# Altium schematic symbol library 2019-09-16_09-55-57.SchLib: 2 symbols
Pins are listed as number, name and electrical type; pins without a type are passive.

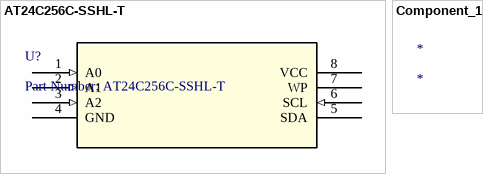
[diagram p0: symbols AT24C256C-SSHL-T to Component_1]

## AT24C256C-SSHL-T
designator U?, comment Part Number: AT24C256C-SSHL-T
No Description Available; Vendor: Atmel; Built_By: EMA_UL_Team; Manufacturer_Part_Number: AT24C256C-SSHL-T; Copyright: Copyright (C) 2018 Accelerated Designs. All rights reserved; RefDes: RefDes; Type: DEV; Value: Value
footprint 8S1
pins: 1 A0 (in), 2 A1 (in), 3 A2 (in), 4 GND (power), 5 SDA, 6 SCL (in), 7 WP, 8 VCC (power)

## Component_1
designator *